# Altium schematic symbol library LM317LBDR2G.SchLib: 1 symbol
Pins are listed as number, name and electrical type; pins without a type are passive.

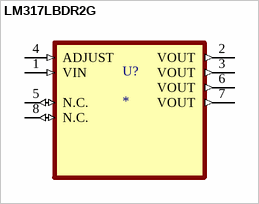
[diagram p0: symbol LM317LBDR2G]

## LM317LBDR2G
designator U?
Linear Voltage Regulator IC Positive Adjustable 1 Output 100mA 8-SOIC; MF: ON Semiconductor; MP: LM317LBDR2G; SnapEDA_Link: https://www.snapeda.com/parts/LM317LBDR2G/Onsemi/view-part/?ref=snap; Package: Package; Value: *; Check_prices: https://www.snapeda.com/parts/LM317LBDR2G/Onsemi/view-part/?ref=eda
footprint SOIC127P600X175-8N
pins: 1 VIN (in), 2 VOUT (out), 3 VOUT (out), 4 ADJUST (in), 5 N.C. (io), 6 VOUT (out), 7 VOUT (out), 8 N.C. (io)